# Altium footprint library 22232031.PcbLib: 1 footprints
Each footprint in its own frame and in the unit in brackets; x right, y up, seen from the top. Pads: shape width x height; smd on the part's side, far side on the other; paste and mask are expansions set on the pad; w line width, h text height; cw(c..) or ccw(c..) is an arc to the next point about the centre after c.
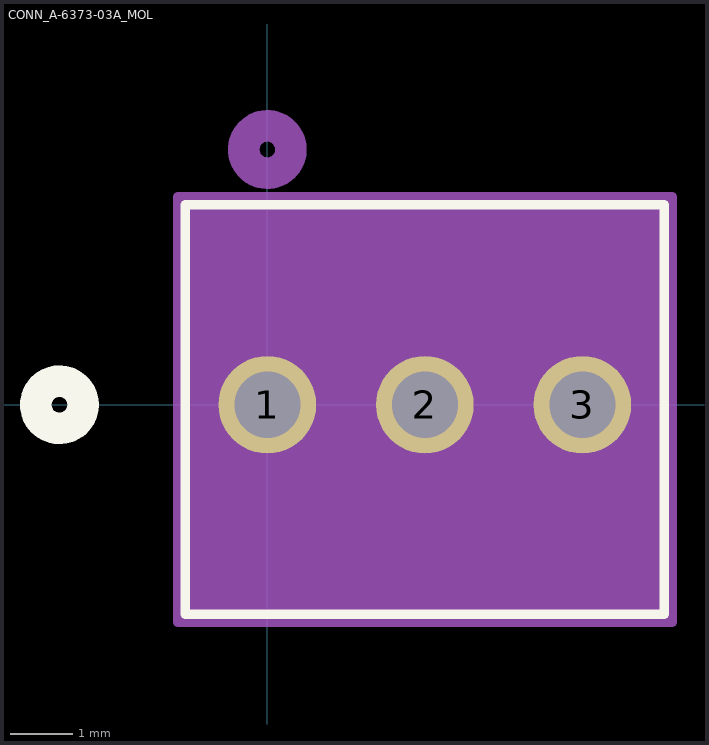
[diagram p0: the footprint, top view; thin cyan lines are the x and y axes]

## CONN_A-6373-03A_MOL [mil]
pads (3):
  round 62 / inner round 60 / far side round 62 hole 42 paste-99999 mask+0: 1(0,0) 2(100,0) 3(200,0)
Top Overlay:
  circle w20: c-132,0 r15
  lines w6: -52,-132.95 -52,127.05 252,127.05 252,-132.95 -52,-132.95
Bottom Overlay:
  circle w20: c-132,0 r15
Mechanical 13:
  circle w20: c0,162.05 r15
  lines w1: -47,-127.95 -47,122.05 247,122.05 247,-127.95 -47,-127.95
Mechanical 15:
  region: 257,132.05 -57,132.05 -57,-137.95 257,-137.95
  lines w6: -57,-137.95 257,-137.95 257,132.05 -57,132.05 -57,-137.95
3D body "022232031.stp": height 357.5, standoff -202.5, extent -47,-128 247,122